# Altium footprint library altiumll.PcbLib: 39 footprints (part 2 of 3)
Each footprint in its own frame and in the unit in brackets; x right, y up, seen from the top. Pads: shape width x height; smd on the part's side, far side on the other; paste and mask are expansions set on the pad; w line width, h text height; cw(c..) or ccw(c..) is an arc to the next point about the centre after c.
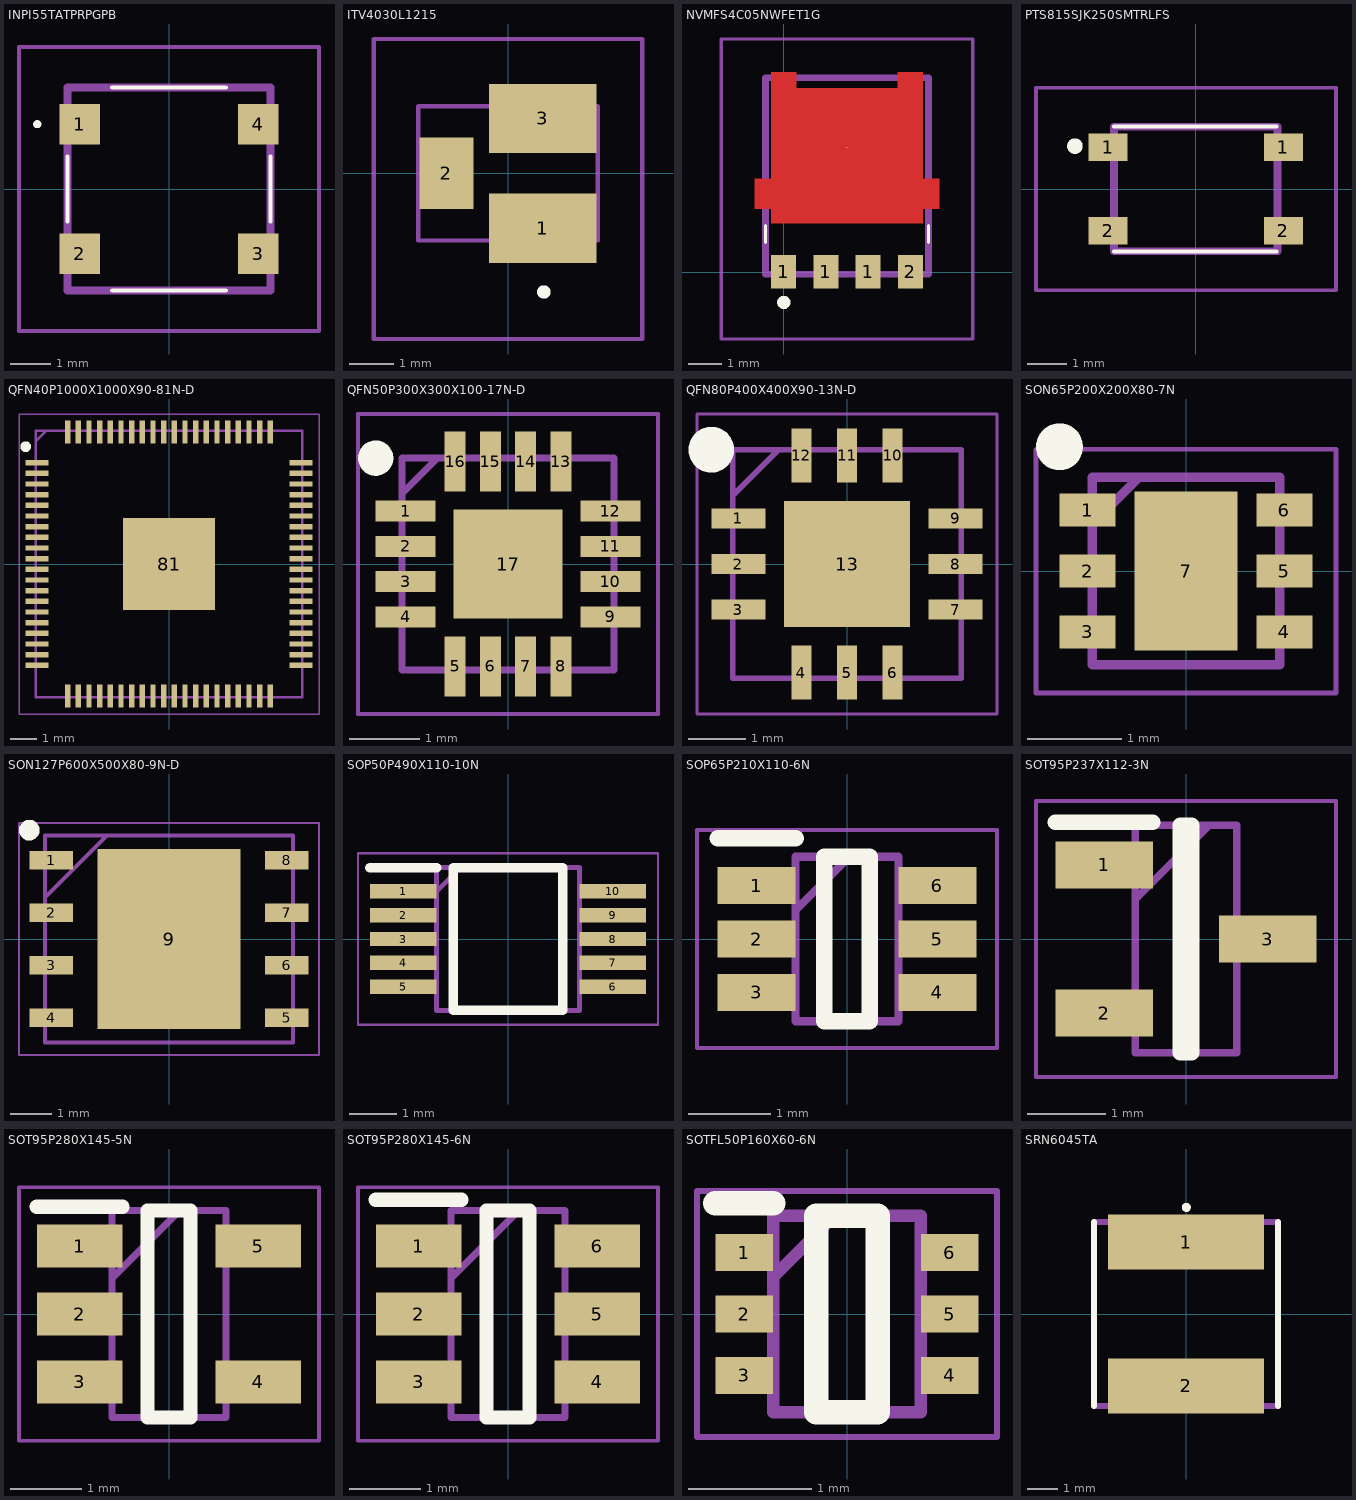
[diagram p1: the footprints below, top view; thin cyan lines are the x and y axes]

## INPI55TATPRPGPB [mm]
pads (4):
  rect 1x1 smd: 1(-2.2,1.6) 2(-2.2,-1.6) 3(2.2,-1.6) 4(2.2,1.6)
Top Overlay:
  lines w0.1: -2.5,-0.8 -2.5,0.8 ; -1.4,-2.5 1.4,-2.5 ; -1.4,2.5 1.4,2.5 ; 2.5,-0.8 2.5,0.8 ; -3.3,1.6 cw(c-3.25,1.6) -3.2,1.6 cw(c-3.25,1.6) -3.3,1.6
Mechanical 13:
  lines w0.2: -2.5,-2.5 2.5,-2.5 2.5,2.5 -2.5,2.5 -2.5,-2.5
Mechanical 15:
  lines w0.1: -3.7,-3.5 3.7,-3.5 3.7,3.5 -3.7,3.5 -3.7,-3.5
3D body "IN-PI55TATPRPGPB.stp": height 1.6, standoff 0, extent -2.7,-2.5 2.7,2.5

## ITV4030L1215 [mm]
pads (3):
  rect 2.4x1.55 smd: 1(0.775,-1.225) 3(0.775,1.225)
  rect 1.2x1.6 smd: 2(-1.375,0)
Top Overlay:
  lines w0.2: 0.8,-2.7 ccw(c0.8,-2.65) 0.8,-2.6 ; 0.8,-2.7 cw(c0.8,-2.65) 0.8,-2.6 ; 0.8,-2.7 ccw(c0.8,-2.65) 0.8,-2.6
Mechanical 13:
  lines w0.1: -2,-1.5 -2,1.5 2,1.5 2,-1.5 -2,-1.5
Mechanical 15:
  lines w0.1: -3,-3.7 -3,3 3,3 3,-3.7 -3,-3.7
3D body "ITV4030L1215.stp": height 1, standoff 0, extent -2,-1.845 2,1.845

## NVMFS4C05NWFET1G [mm]
pads (5):
  rect 0.75x1 smd: 1(0,0.021) 1(1.27,0.021) 1(2.54,0.021) 2(3.81,0.021)
  round 0.025 smd: 3(1.905,3.75)
Top Layer:
  region: -0.87,1.909 -0.38,1.909 -0.375,1.914 -0.375,1.484 4.185,1.484 4.185,1.914 4.19,1.909 4.68,1.909 4.68,2.819 4.19,2.819 4.185,2.814 4.185,6.017 3.435,6.017 3.435,5.542 0.375,5.542 0.375,6.017 -0.375,6.017 -0.375,2.814 -0.38,2.819 -0.87,2.819
Top Overlay:
  lines w0.1: -0.545,0.9 -0.545,1.4 ; 4.355,0.9 4.355,1.4
  lines w0.2: -0.095,-0.9 cw(c0.005,-0.9) 0.105,-0.9 cw(c0.005,-0.9) -0.095,-0.9
Mechanical 13:
  lines w0.2: -0.545,-0.05 -0.545,5.85 4.355,5.85 4.355,-0.05 -0.545,-0.05
Mechanical 15:
  lines w0.1: -1.87,-2 -1.87,7.017 5.68,7.017 5.68,-2 -1.87,-2
3D body "NTMFS003P03P8ZT1G.stp": height 1.1, standoff 0, extent -0.675,-0.275 4.475,5.875

## PTS815SJK250SMTRLFS [mm]
pads (4):
  rect 1x0.7 smd: 1(-2.25,1.075) 1(2.25,1.075) 2(-2.25,-1.075) 2(2.25,-1.075)
Top Overlay:
  lines w0.1: -2.1,-1.6 2.075,-1.6 ; -2.1,1.6 2.075,1.6
  lines w0.2: -3.1,1 cw(c-3.1,1.1) -3.1,1.2 cw(c-3.1,1.1) -3.1,1
Mechanical 13:
  lines w0.2: -2.1,-1.6 2.1,-1.6 2.1,1.6 -2.1,1.6 -2.1,-1.6
Mechanical 15:
  lines w0.1: -4.1,-2.6 3.6,-2.6 3.6,2.6 -4.1,2.6 -4.1,-2.6
3D body "PTS815_SJK_250_SMTR_LFS.stp": height 2.5, standoff 0, extent -2.3,-1.6 2.3,1.6

## QFN40P1000X1000X90-81N-D [mm]
pads (81):
  rect 0.85x0.2 smd: 1(-4.95,3.8) 2(-4.95,3.4) 3(-4.95,3) 4(-4.95,2.6) 5(-4.95,2.2) 6(-4.95,1.8) 7(-4.95,1.4) 8(-4.95,1) 9(-4.95,0.6) 10(-4.95,0.2) 11(-4.95,-0.2) 12(-4.95,-0.6) 13(-4.95,-1) 14(-4.95,-1.4) 15(-4.95,-1.8) 16(-4.95,-2.2) 17(-4.95,-2.6) 18(-4.95,-3) 19(-4.95,-3.4) 20(-4.95,-3.8) 41(4.95,-3.8) 42(4.95,-3.4) 43(4.95,-3) 44(4.95,-2.6) 45(4.95,-2.2) 46(4.95,-1.8) 47(4.95,-1.4) 48(4.95,-1) 49(4.95,-0.6) 50(4.95,-0.2) 51(4.95,0.2) 52(4.95,0.6) 53(4.95,1) 54(4.95,1.4) 55(4.95,1.8) 56(4.95,2.2) 57(4.95,2.6) 58(4.95,3) 59(4.95,3.4) 60(4.95,3.8)
  rect 0.2x0.85 smd: 21(-3.8,-4.95) 22(-3.4,-4.95) 23(-3,-4.95) 24(-2.6,-4.95) 25(-2.2,-4.95) 26(-1.8,-4.95) 27(-1.4,-4.95) 28(-1,-4.95) 29(-0.6,-4.95) 30(-0.2,-4.95) 31(0.2,-4.95) 32(0.6,-4.95) 33(1,-4.95) 34(1.4,-4.95) 35(1.8,-4.95) 36(2.2,-4.95) 37(2.6,-4.95) 38(3,-4.95) 39(3.4,-4.95) 40(3.8,-4.95) 61(3.8,4.95) 62(3.4,4.95) 63(3,4.95) 64(2.6,4.95) 65(2.2,4.95) 66(1.8,4.95) 67(1.4,4.95) 68(1,4.95) 69(0.6,4.95) 70(0.2,4.95) 71(-0.2,4.95) 72(-0.6,4.95) 73(-1,4.95) 74(-1.4,4.95) 75(-1.8,4.95) 76(-2.2,4.95) 77(-2.6,4.95) 78(-3,4.95) 79(-3.4,4.95) 80(-3.8,4.95)
  rect 3.45x3.45 smd: 81(0,0)
Top Overlay:
  circle w0.2: c-5.375,4.4 r0.1
Mechanical 13:
  lines w0.1: -5,4.6 -4.6,5 ; -5,-5 -5,5 5,5 5,-5 -5,-5
Mechanical 15:
  lines w0.05: -5.625,-5.625 -5.625,5.625 5.625,5.625 5.625,-5.625 -5.625,-5.625
3D body "RP2350B.stp": height 0.9, standoff 0, extent -5.05,-5.05 5.05,5.05

## QFN50P300X300X100-17N-D [mm]
pads (17):
  rect 0.85x0.3 smd: 1(-1.45,0.75) 2(-1.45,0.25) 3(-1.45,-0.25) 4(-1.45,-0.75) 9(1.45,-0.75) 10(1.45,-0.25) 11(1.45,0.25) 12(1.45,0.75)
  rect 0.3x0.85 smd: 5(-0.75,-1.45) 6(-0.25,-1.45) 7(0.25,-1.45) 8(0.75,-1.45) 13(0.75,1.45) 14(0.25,1.45) 15(-0.25,1.45) 16(-0.75,1.45)
  rect 1.55x1.55 smd: 17(0,0)
Top Overlay:
  circle w0.25: c-1.875,1.5 r0.125
Mechanical 13:
  lines w0.1: -1.5,1 -1,1.5 ; -1.5,-1.5 1.5,-1.5 1.5,1.5 -1.5,1.5 -1.5,-1.5
Mechanical 15:
  lines w0.05: -2.125,-2.125 2.125,-2.125 2.125,2.125 -2.125,2.125 -2.125,-2.125
3D body "TCA6408ARGTR.stp": height 1, standoff 0, extent -1.5,-1.5 1.5,1.5

## QFN80P400X400X90-13N-D [mm]
pads (13):
  rect 0.95x0.35 smd: 1(-1.9,0.8) 2(-1.9,0) 3(-1.9,-0.8) 7(1.9,-0.8) 8(1.9,0) 9(1.9,0.8)
  rect 0.35x0.95 smd: 4(-0.8,-1.9) 5(0,-1.9) 6(0.8,-1.9) 10(0.8,1.9) 11(0,1.9) 12(-0.8,1.9)
  rect 2.2x2.2 smd: 13(0,0)
Top Overlay:
  circle w0.4: c-2.375,2 r0.2
Mechanical 13:
  lines w0.1: -2,1.2 -1.2,2 ; -2,-2 -2,2 2,2 2,-2 -2,-2
Mechanical 15:
  lines w0.05: -2.625,-2.625 -2.625,2.625 2.625,2.625 2.625,-2.625 -2.625,-2.625
3D body "EMC2303-1-KP-TR.stp": height 0.9, standoff 0, extent -2.05,-2.05 2.05,2.05

## SON65P200X200X80-7N [mm]
pads (7):
  rect 0.6x0.35 smd: 1(-1.05,0.65) 2(-1.05,0) 3(-1.05,-0.65) 4(1.05,-0.65) 5(1.05,0) 6(1.05,0.65)
  rect 1.1x1.7 smd: 7(0,0)
Top Overlay:
  circle w0.25: c-1.35,1.325 r0.125
Mechanical 13:
  lines w0.1: -1,0.5 -0.5,1 ; -1,-1 -1,1 1,1 1,-1 -1,-1
Mechanical 15:
  lines w0.05: -1.6,-1.3 -1.6,1.3 1.6,1.3 1.6,-1.3 -1.6,-1.3
3D body "TPS22810DRVR.stp": height 0.8, standoff 0, extent -1,-1 1,1

## SON127P600X500X80-9N-D [mm]
pads (9):
  rect 1.05x0.45 smd: 1(-2.85,1.905) 2(-2.85,0.635) 3(-2.85,-0.635) 4(-2.85,-1.905) 5(2.85,-1.905) 6(2.85,-0.635) 7(2.85,0.635) 8(2.85,1.905)
  rect 3.45x4.35 smd: 9(0,0)
Top Overlay:
  circle w0.25: c-3.375,2.63 r0.125
Mechanical 13:
  lines w0.1: -3,1 -1.5,2.5 ; -3,-2.5 3,-2.5 3,2.5 -3,2.5 -3,-2.5
Mechanical 15:
  lines w0.05: -3.625,-2.8 3.625,-2.8 3.625,2.8 -3.625,2.8 -3.625,-2.8
3D body "W25Q64JVZPIQ.stp": height 0.8, standoff 0, extent -3.05,-2.5 3.05,2.5

## SOP50P490X110-10N [mm]
pads (10):
  rect 1.4x0.3 smd: 1(-2.2,1) 2(-2.2,0.5) 3(-2.2,0) 4(-2.2,-0.5) 5(-2.2,-1) 6(2.2,-1) 7(2.2,-0.5) 8(2.2,0) 9(2.2,0.5) 10(2.2,1)
Top Overlay:
  lines w0.2: -2.9,1.5 -1.5,1.5 ; -1.15,-1.5 1.15,-1.5 1.15,1.5 -1.15,1.5 -1.15,-1.5
Mechanical 13:
  lines w0.1: -1.5,1 -1,1.5 ; -1.5,-1.5 1.5,-1.5 1.5,1.5 -1.5,1.5 -1.5,-1.5
Mechanical 15:
  lines w0.05: -3.15,-1.8 3.15,-1.8 3.15,1.8 -3.15,1.8 -3.15,-1.8
3D body "ADS1115IDGSR.stp": height 1.1, standoff 0, extent -2.463,-1.5 2.463,1.5

## SOP65P210X110-6N [mm]
pads (6):
  rect 0.95x0.45 smd: 1(-1.1,0.65) 2(-1.1,0) 3(-1.1,-0.65) 4(1.1,-0.65) 5(1.1,0) 6(1.1,0.65)
Top Overlay:
  lines w0.2: -1.575,1.225 -0.625,1.225 ; -0.275,-1 0.275,-1 0.275,1 -0.275,1 -0.275,-1
Mechanical 13:
  lines w0.1: -0.625,0.35 0.025,1 ; -0.625,-1 0.625,-1 0.625,1 -0.625,1 -0.625,-1
Mechanical 15:
  lines w0.05: -1.825,-1.325 1.825,-1.325 1.825,1.325 -1.825,1.325 -1.825,-1.325
3D body "SN74LVC2G17DCKR.stp": height 1.1, standoff 0, extent -1.05,-1 1.05,1

## SOT95P237X112-3N [mm]
pads (3):
  rect 1.25x0.6 smd: 1(-1.05,0.95) 2(-1.05,-0.95) 3(1.05,0)
Top Overlay:
  lines w0.2: -1.675,1.5 -0.425,1.5 ; -0.075,-1.46 -0.075,1.46 0.075,1.46 0.075,-1.46 -0.075,-1.46
Mechanical 13:
  lines w0.1: -0.65,0.51 0.3,1.46 ; -0.65,-1.46 -0.65,1.46 0.65,1.46 0.65,-1.46 -0.65,-1.46
Mechanical 15:
  lines w0.05: -1.925,-1.77 -1.925,1.77 1.925,1.77 1.925,-1.77 -1.925,-1.77
3D body "LM4040A30IDBZR.stp": height 1, standoff 0, extent -1.27,-1.46 1.27,1.46

## SOT95P280X145-5N [mm]
pads (5):
  rect 1.2x0.6 smd: 1(-1.25,0.95) 2(-1.25,0) 3(-1.25,-0.95) 4(1.25,-0.95) 5(1.25,0.95)
Top Overlay:
  lines w0.2: -1.85,1.5 -0.65,1.5 ; -0.3,-1.45 0.3,-1.45 0.3,1.45 -0.3,1.45 -0.3,-1.45
Mechanical 13:
  lines w0.1: -0.8,0.5 0.15,1.45 ; -0.8,-1.45 0.8,-1.45 0.8,1.45 -0.8,1.45 -0.8,-1.45
Mechanical 15:
  lines w0.05: -2.1,-1.775 2.1,-1.775 2.1,1.775 -2.1,1.775 -2.1,-1.775
3D body "TPS7A2028PDBVR.stp": height 1.2, standoff 0, extent -1.4,-1.45 1.4,1.45

## SOT95P280X145-6N [mm]
pads (6):
  rect 1.2x0.6 smd: 1(-1.25,0.95) 2(-1.25,0) 3(-1.25,-0.95) 4(1.25,-0.95) 5(1.25,0) 6(1.25,0.95)
Top Overlay:
  lines w0.2: -1.85,1.6 -0.65,1.6 ; -0.3,-1.45 0.3,-1.45 0.3,1.45 -0.3,1.45 -0.3,-1.45
Mechanical 13:
  lines w0.1: -0.8,0.5 0.15,1.45 ; -0.8,-1.45 0.8,-1.45 0.8,1.45 -0.8,1.45 -0.8,-1.45
Mechanical 15:
  lines w0.05: -2.1,-1.775 2.1,-1.775 2.1,1.775 -2.1,1.775 -2.1,-1.775
3D body "TPS3808G50DBVR.stp": height 1.2, standoff 0, extent -1.4,-1.45 1.4,1.45

## SOTFL50P160X60-6N [mm]
pads (6):
  rect 0.47x0.3 smd: 1(-0.835,0.5) 2(-0.835,0) 3(-0.835,-0.5) 4(0.835,-0.5) 5(0.835,0) 6(0.835,0.5)
Top Overlay:
  lines w0.2: -1.07,0.9 -0.6,0.9 ; -0.25,-0.8 -0.25,0.8 0.25,0.8 0.25,-0.8 -0.25,-0.8
Mechanical 13:
  lines w0.1: -0.6,0.3 -0.1,0.8 ; -0.6,-0.8 -0.6,0.8 0.6,0.8 0.6,-0.8 -0.6,-0.8
Mechanical 15:
  lines w0.05: -1.22,-1 -1.22,1 1.22,1 1.22,-1 -1.22,-1
3D body "TMP112AIDRLT.stp": height 0.6, standoff 0, extent -0.8,-0.8 0.8,0.8

## SRN6045TA [mm]
pads (2):
  rect 5.1x1.8 smd: 1(0,2.35) 2(0,-2.35)
Top Overlay:
  circle w0.2: c0.009,3.484 r0.048
  lines w0.2: -3,-3 -3,3 ; 3,-3 3,3
Mechanical 13:
  lines w0.2: -3,-3 -3,3 3,3 3,-3 -3,-3
3D body "SRN6045TA-680M.stp": height 4, standoff 0.04, extent -2.997,-2.997 2.997,2.997